# Altium footprint library 10µF、100V、±20%、105℃_100YXJ10M6.3X11.PcbLib: 1 footprints
Each footprint in its own frame and in the unit in brackets; x right, y up, seen from the top. Pads: shape width x height; smd on the part's side, far side on the other; paste and mask are expansions set on the pad; w line width, h text height; cw(c..) or ccw(c..) is an arc to the next point about the centre after c.
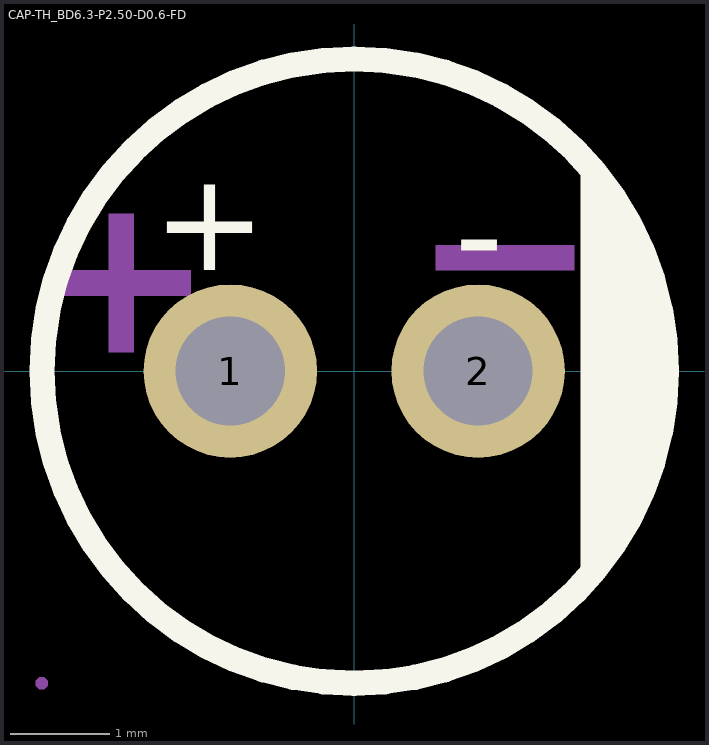
[diagram p0: the footprint, top view; thin cyan lines are the x and y axes]

## CAP-TH_BD6.3-P2.50-D0.6-FD [mm]
pads (2):
  round 1.75 hole 1.1 paste-2539.97 mask+0.05: 1(-1.25,0) 2(1.25,0)
Top Overlay:
  circle w0.254: c0,0 r3.15
  region: 2.286,-2.286 2.285,2.17 2.286,2.169 2.454,1.987 2.607,1.793 2.744,1.587 2.865,1.372 2.969,1.147 3.054,0.915 3.122,0.677 3.17,0.434 3.199,0.189 3.209,-0.059 3.199,-0.306 3.17,-0.551 3.122,-0.794 3.054,-1.032 2.969,-1.264 2.865,-1.489 2.744,-1.704 2.607,-1.91 2.454,-2.104 2.286,-2.286
  lines w0.254: -3.15,0 ccw(c0,0) 3.15,0 ccw(c0,0) -3.15,0
  text "-" at 1.016,0.889 h1
  text "+" at -2.032,1.016 h1
Mechanical 2:
  region: 0.826,1.27 2.222,1.27 2.222,1.016 0.826,1.016
  region: -2.476,0.191 -2.476,1.587 -2.222,1.587 -2.222,0.191
  region: -3.048,1.016 -1.651,1.016 -1.651,0.762 -3.048,0.762
Mechanical 6:
  lines w0.051: -3.152,-0.001 ccw(c-0.002,-0.001) -0.002,-3.151 0.001,-3.151 ccw(c0.001,-0.005) 3.147,-0.005 3.147,0.005 ccw(c0,0.005) 0,3.152 -0.003,3.152 ccw(c-0.003,0.003) -3.152,0.003 -3.152,-0.001
Mechanical 8:
  region: -3.092,-3.151 -3.092,-3.176 -3.127,-3.211 -3.177,-3.211 -3.212,-3.176 -3.212,-3.151 -3.212,-3.126 -3.177,-3.091 -3.127,-3.091 -3.092,-3.126 -3.092,-3.151
Mechanical 9:
  region: 1.55,0 1.55,-0.06 1.504,-0.17 1.42,-0.254 1.31,-0.3 1.19,-0.3 1.08,-0.254 0.996,-0.17 0.95,-0.06 0.95,0 0.95,0.06 0.996,0.17 1.08,0.254 1.19,0.3 1.31,0.3 1.42,0.254 1.504,0.17 1.55,0.06 1.55,0
  region: -0.95,0 -0.95,-0.06 -0.996,-0.17 -1.08,-0.254 -1.19,-0.3 -1.31,-0.3 -1.42,-0.254 -1.504,-0.17 -1.55,-0.06 -1.55,0 -1.55,0.06 -1.504,0.17 -1.42,0.254 -1.31,0.3 -1.19,0.3 -1.08,0.254 -0.996,0.17 -0.95,0.06 -0.95,0